# Altium footprint library leaded_th.PcbLib: 7 footprints
Each footprint in its own frame and in the unit in brackets; x right, y up, seen from the top. Pads: shape width x height; smd on the part's side, far side on the other; paste and mask are expansions set on the pad; w line width, h text height; cw(c..) or ccw(c..) is an arc to the next point about the centre after c.
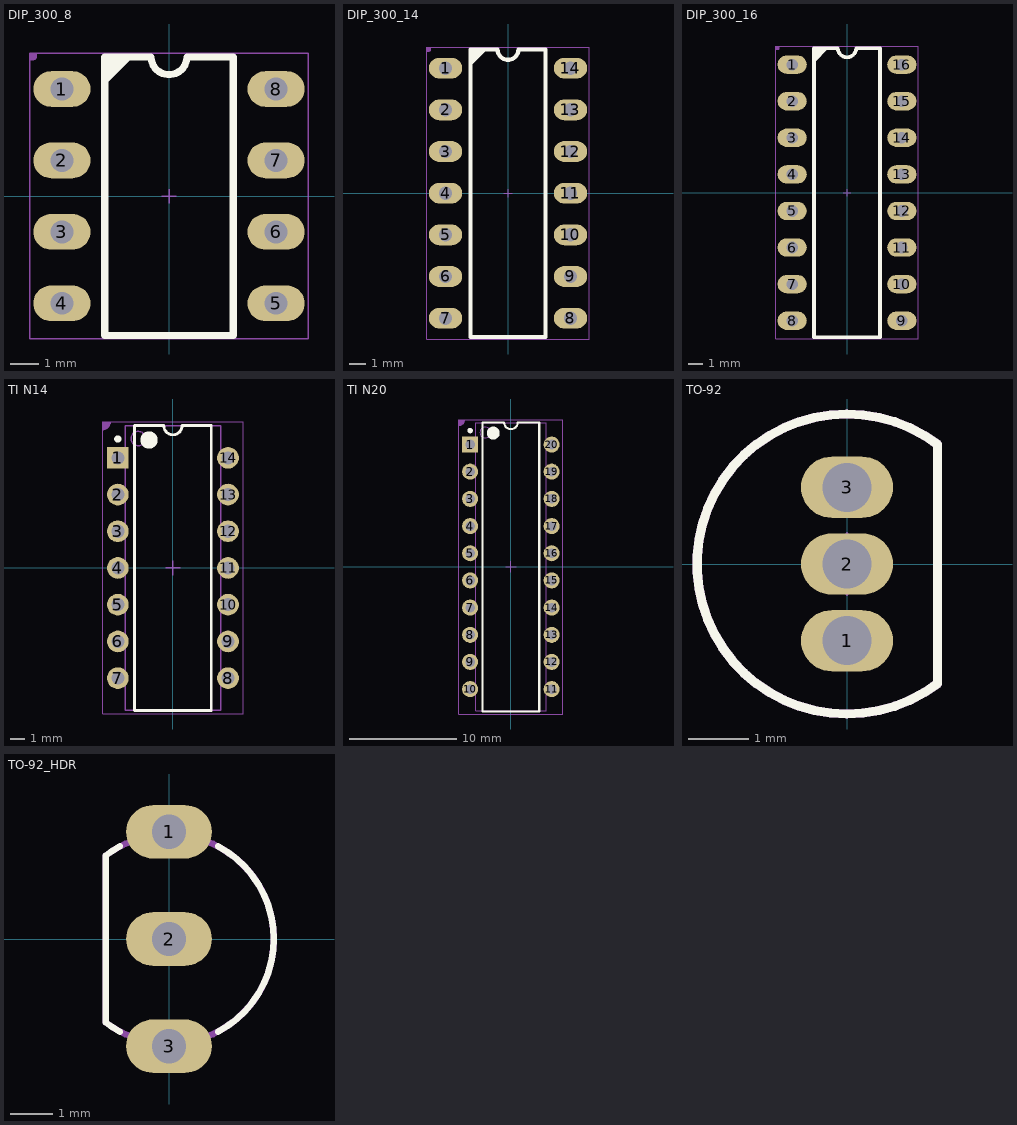
[diagram p0: the footprints below, top view; thin cyan lines are the x and y axes]

## DIP_300_8 [mil]
pads (8):
  oval 80x50 hole 32: 1(-150,150) 2(-150,50) 3(-150,-50) 4(-150,-150) 5(150,-150) 6(150,-50) 7(150,50) 8(150,150)
Top Overlay:
  region: -90,194.69 -50.63,194.69 -90,155.31
  lines w10: -90,-195 90,-195 90,195 25,195 cw(c0,195) -25,195 -90,195 -90,-195
Mechanical 13:
  lines w2: -10,0 10,0 ; 0,-10 0,10
Top Component:
  region: -195,200 -185,200 -185,195 -185,194.01 -185.76,192.17 -187.17,190.76 -189.01,190 -190,190 -195,190
  lines w2: -195,-200 195,-200 195,200 -195,200 -195,-200
  text ".Designator" at -40,-30 h100
3D body "User Library-DIP8test.STEP": height 179.92, standoff -150, extent -153.94,-195.07 153.94,195.08

## DIP_300_14 [mil]
pads (14):
  oval 80x50 hole 32: 1(-150,300) 2(-150,200) 3(-150,100) 4(-150,0) 5(-150,-100) 6(-150,-200) 7(-150,-300) 8(150,-300) 9(150,-200) 10(150,-100) 11(150,0) 12(150,100) 13(150,200) 14(150,300)
Top Overlay:
  region: -90,344.69 -50.63,344.69 -90,305.31
  lines w10: -90,-345 -90,345 -25,345 ccw(c0,345) 25,345 90,345 90,-345 -90,-345
Mechanical 13:
  lines w2: -10,0 10,0 ; 0,-10 0,10
Top Component:
  region: -195,350 -185,350 -185,345 -185,344.01 -185.76,342.17 -187.17,340.76 -189.01,340 -190,340 -195,340
  lines w2: -195,-350 -195,350 195,350 195,-350 -195,-350
  text ".Designator" at -40,-30 h100
3D body "SW3dPS-DIP14-300.STEP": height 200, standoff -98.03, extent -154.92,-383.86 154.93,383.86

## DIP_300_16 [mil]
pads (16):
  oval 80x50 hole 32: 1(-150,350) 2(-150,250) 3(-150,150) 4(-150,50) 5(-150,-50) 6(-150,-150) 7(-150,-250) 8(-150,-350) 9(150,-350) 10(150,-250) 11(150,-150) 12(150,-50) 13(150,50) 14(150,150) 15(150,250) 16(150,350)
Top Overlay:
  region: -90,394.69 -50.63,394.69 -90,355.31
  lines w10: -90,-395 -90,395 -25,395 ccw(c0,395) 25,395 90,395 90,-395 -90,-395
Mechanical 13:
  lines w2: -10,0 10,0 ; 0,-10 0,10
Top Component:
  region: -195,400 -185,400 -185,395 -185,394.01 -185.76,392.17 -187.17,390.76 -189.01,390 -190,390 -195,390
  lines w2: -195,-400 195,-400 195,400 -195,400 -195,-400
  text ".Designator" at -40,-30 h100
3D body "User Library-DIP16-22mm.STEP": height 202.76, standoff -98.03, extent -155,-433.07 154.84,433.07

## TI N14 [mm] "DIP, 14-Leads, Body 19.305x6.35 mm, Pitch 2.54 mm"
height 5.08
pads (14):
  rect 1.5x1.5 hole 0.9: 1(-3.81,7.62)
  round 1.5 hole 0.9: 2(-3.81,5.08) 3(-3.81,2.54) 4(-3.81,0) 5(-3.81,-2.54) 6(-3.81,-5.08) 7(-3.81,-7.62) 8(3.81,-7.62) 9(3.81,-5.08) 10(3.81,-2.54) 11(3.81,0) 12(3.81,2.54) 13(3.81,5.08) 14(3.81,7.62)
Top Overlay:
  circle w0.6: c-1.65,8.85 r0.3
  circle w0.25: c-3.81,8.92 r0.125
  lines w0.2: -2.65,-9.85 2.65,-9.85 2.65,9.85 0.635,9.85 cw(c0,9.85) -0.635,9.85 -2.65,9.85 -2.65,-9.85
Mechanical 13:
  circle w0.1: c-2.4,8.95 r0.5
  lines w0.1: -3.3,-9.85 3.3,-9.85 3.3,9.85 -3.3,9.85 -3.3,-9.85
Top Component:
  region: -4.851,10.109 -4.851,9.576 -4.699,9.576 -4.648,9.627 -4.572,9.627 -4.369,9.83 -4.369,9.906 -4.311,9.982 -4.293,10.1 -4.311,10.109
  lines w0.051: -4.851,9.569 ccw(c-4.851,10.109) -4.311,10.109 ; -4.851,-10.091 4.849,-10.091 4.849,10.109 -4.851,10.109 -4.851,-10.091
  text ".Designator" at -1.016,-0.762 h2.54
Component Center (Mech19):
  lines w0.051: -4.85,-10.1 4.85,-10.1 4.85,10.1 -4.85,10.1 -4.85,-10.1
  lines w0.1: -0.5,0 0.5,0 ; 0,-0.5 0,0.5
3D body "CircuitWorks-DIP-14.step": height 4.05, standoff -2.93, extent -4,-9.525 4,9.525

## TI N20 [mm] "DIP, 20-Leads, Body 25.4x6.35 mm, Pitch 2.54 mm"
height 5.08
pads (20):
  rect 1.5x1.5 hole 0.9: 1(-3.81,11.43)
  round 1.5 hole 0.9: 2(-3.81,8.89) 3(-3.81,6.35) 4(-3.81,3.81) 5(-3.81,1.27) 6(-3.81,-1.27) 7(-3.81,-3.81) 8(-3.81,-6.35) 9(-3.81,-8.89) 10(-3.81,-11.43) 11(3.81,-11.43) 12(3.81,-8.89) 13(3.81,-6.35) 14(3.81,-3.81) 15(3.81,-1.27) 16(3.81,1.27) 17(3.81,3.81) 18(3.81,6.35) 19(3.81,8.89) 20(3.81,11.43)
Top Overlay:
  circle w0.25: c-3.81,12.73 r0.125
  circle w0.6: c-1.65,12.5 r0.3
  lines w0.2: -2.65,-13.5 -2.65,13.5 -0.635,13.5 ccw(c0,13.5) 0.635,13.5 2.65,13.5 2.65,-13.5 -2.65,-13.5
Mechanical 13:
  circle w0.1: c-2.4,12.55 r0.5
  lines w0.1: -3.3,-13.45 -3.3,13.45 3.3,13.45 3.3,-13.45 -3.3,-13.45
Top Component:
  region: -4.851,13.741 -4.851,13.208 -4.699,13.208 -4.648,13.259 -4.572,13.259 -4.369,13.462 -4.369,13.538 -4.311,13.614 -4.293,13.732 -4.311,13.741
  lines w0.05: -4.85,-13.75 4.85,-13.75 4.85,13.75 -4.85,13.75 -4.85,-13.75
  lines w0.051: -4.851,13.201 ccw(c-4.851,13.741) -4.311,13.741
  text ".Designator" at -1.016,-0.762 h2.54
Component Center (Mech19):
  lines w0.05: -4.85,-13.75 4.85,-13.75 4.85,13.75 -4.85,13.75 -4.85,-13.75
  lines w0.1: -0.5,0 0.5,0 ; 0,-0.5 0,0.5
3D body "User Library-DIP-20P-M01.step": height 4.36, standoff -3, extent -3.935,-12.3 3.935,12.3

## TO-92 [mil]
pads (3):
  oval 60x40 hole 32: 1(0,-50) 2(0,0) 3(0,50)
Top Overlay:
  lines w6: 59.06,-77.95 cw(c0,0) 59.06,77.95 59.05,-77.95
Mechanical 13:
  lines w2: -10,0 10,0 ; 0,-10 0,10
  lines w6: 59.06,-77.95 cw(c0,0) 59.06,77.95 59.05,-77.95
Top Component:
  lines w4: 58.52,-78.36 cw(c0,0) 59.48,77.63 59.48,-77.4 58.52,-78.36
  text ".Designator" at -20,-15 h50
Bottom Component (Mech15):
  lines w2: -20,0 20,0 ; 0,-20 0,20
3D body "SW3dPS-TO-92.STEP": height 405.76, standoff -228.35, extent -120,-124.1 69.37,120

## TO-92_HDR [mil]
pads (3):
  oval 80x50 hole 32: 1(0,100) 2(0,0) 3(0,-100)
Top Overlay:
  lines w6: -45.76,-86.43 cw(c0,0) -59.06,-77.95 -59.05,77.95 cw(c0,0) -45.76,86.43 ; 45.76,-86.43 ccw(c0,0) 45.76,86.43
Mechanical 13:
  lines w2: -10,0 10,0 ; 0,-10 0,10
  lines w6: -59.06,-77.95 ccw(c0,0) -59.06,77.95 -59.05,-77.95
Top Component:
  lines w2: -59.48,-77.63 ccw(c0,0) -58.52,78.36 -59.48,77.4 -59.48,-77.63
  text ".Designator" at 20,15 h50
Bottom Component (Mech15):
  lines w2: -20,0 20,0 ; 0,-20 0,20
3D body "User Library-TO-92-4.STEP": height 409.84, standoff -300, extent -60.24,-112.28 104.72,113.7